# Altium schematic symbol library Orion-Bridge.SchLib: 52 symbols
Pins are listed as number, name and electrical type; pins without a type are passive.

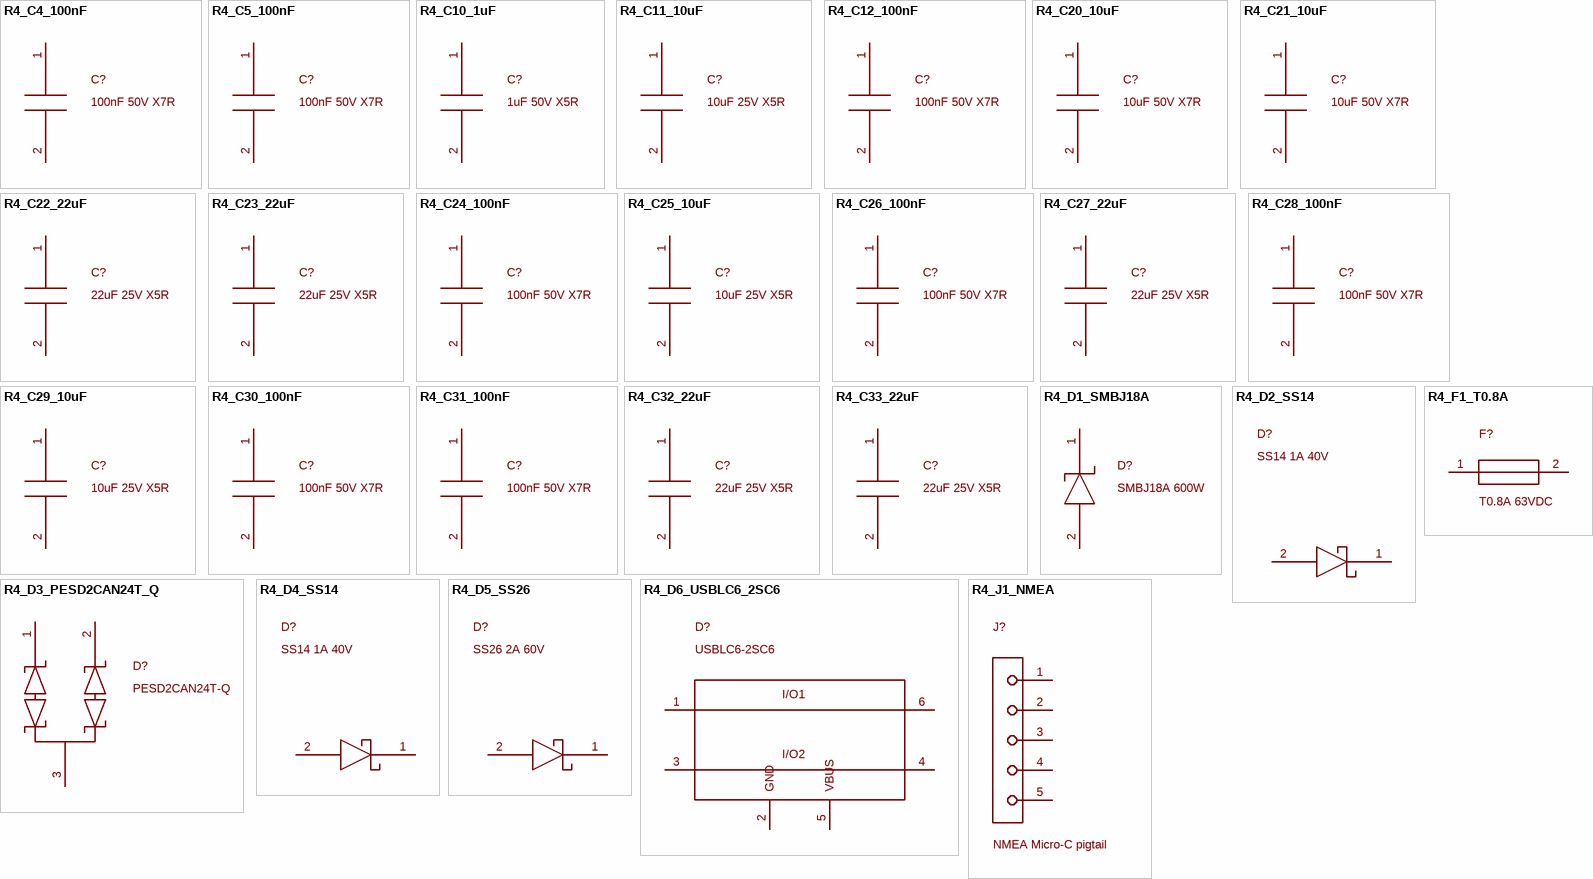
[diagram p0: symbols R4_C4_100nF to R4_J1_NMEA]

## R4_C4_100nF
designator C?, comment 100nF 50V X7R
100nF 16V X7R - generic specification; manufacturer/MPN not selected; Manufacturer: YAGEO; MPN: CC0603KRX7R9BB104; Manufacturer Part Number: CC0603KRX7R9BB104; Datasheet: https://www.lcsc.com/datasheet/lcsc_datasheet_2211101700_YAGEO-CC0603KRX7R9BB104_C14663.pdf; Supplier 1: LCSC; Supplier Part Number 1: C14663; Footprint Status: R4 reviewed package; see source and assembly audit
footprint C0603
pins: 1, 2

## R4_C5_100nF
designator C?, comment 100nF 50V X7R
100nF 16V X7R - generic specification; manufacturer/MPN not selected; Manufacturer: YAGEO; MPN: CC0603KRX7R9BB104; Manufacturer Part Number: CC0603KRX7R9BB104; Datasheet: https://www.lcsc.com/datasheet/lcsc_datasheet_2211101700_YAGEO-CC0603KRX7R9BB104_C14663.pdf; Supplier 1: LCSC; Supplier Part Number 1: C14663; Footprint Status: R4 reviewed package; see source and assembly audit
footprint C0603
pins: 1, 2

## R4_C10_1uF
designator C?, comment 1uF 50V X5R
Manufacturer: Samsung Electro-Mechanics; MPN: CL10A105KB8NNNC; Manufacturer Part Number: CL10A105KB8NNNC; Description: 1uF 50V X5R; Datasheet: https://www.lcsc.com/datasheet/lcsc_datasheet_2304140030_Samsung-Electro-Mechanics-CL10A105KB8NNNC_C15849.pdf; Supplier 1: LCSC; Supplier Part Number 1: C15849; Footprint Status: R4 reviewed package; see source and assembly audit
footprint C0603
pins: 1, 2

## R4_C11_10uF
designator C?, comment 10uF 25V X5R
Manufacturer: Samsung Electro-Mechanics; MPN: CL21A106KAYNNNE; Manufacturer Part Number: CL21A106KAYNNNE; Description: 10uF 25V X5R; Datasheet: https://www.lcsc.com/datasheet/lcsc_datasheet_2304140030_Samsung-Electro-Mechanics-CL21A106KAYNNNE_C15850.pdf; Supplier 1: LCSC; Supplier Part Number 1: C15850; Footprint Status: R4 reviewed package; see source and assembly audit
footprint C0805
pins: 1, 2

## R4_C12_100nF
designator C?, comment 100nF 50V X7R
Manufacturer: YAGEO; MPN: CC0603KRX7R9BB104; Manufacturer Part Number: CC0603KRX7R9BB104; Description: 100nF 50V X7R; Datasheet: https://www.lcsc.com/datasheet/lcsc_datasheet_2211101700_YAGEO-CC0603KRX7R9BB104_C14663.pdf; Supplier 1: LCSC; Supplier Part Number 1: C14663; Footprint Status: R4 reviewed package; see source and assembly audit
footprint C0603
pins: 1, 2

## R4_C20_10uF
designator C?, comment 10uF 50V X7R
Manufacturer: Samsung Electro-Mechanics; MPN: CL32B106KBJNNNE; Manufacturer Part Number: CL32B106KBJNNNE; Description: 10uF 50V X7R; Datasheet: https://datasheet.lcsc.com/lcsc/1912112237_Samsung-Electro-Mechanics-CL32B106KBJNNNE_C138687.pdf; Supplier 1: LCSC; Supplier Part Number 1: C138687; Footprint Status: R4 reviewed package; see source and assembly audit
footprint C1210
pins: 1, 2

## R4_C21_10uF
designator C?, comment 10uF 50V X7R
Manufacturer: Samsung Electro-Mechanics; MPN: CL32B106KBJNNNE; Manufacturer Part Number: CL32B106KBJNNNE; Description: 10uF 50V X7R; Datasheet: https://datasheet.lcsc.com/lcsc/1912112237_Samsung-Electro-Mechanics-CL32B106KBJNNNE_C138687.pdf; Supplier 1: LCSC; Supplier Part Number 1: C138687; Footprint Status: R4 reviewed package; see source and assembly audit
footprint C1210
pins: 1, 2

## R4_C22_22uF
designator C?, comment 22uF 25V X5R
Manufacturer: Samsung Electro-Mechanics; MPN: CL31A226KAHNNNE; Manufacturer Part Number: CL31A226KAHNNNE; Description: 22uF 25V X5R; Datasheet: https://www.lcsc.com/datasheet/lcsc_datasheet_2304140030_Samsung-Electro-Mechanics-CL31A226KAHNNNE_C12891.pdf; Supplier 1: LCSC; Supplier Part Number 1: C12891; Footprint Status: R4 reviewed package; see source and assembly audit
footprint C1206
pins: 1, 2

## R4_C23_22uF
designator C?, comment 22uF 25V X5R
Manufacturer: Samsung Electro-Mechanics; MPN: CL31A226KAHNNNE; Manufacturer Part Number: CL31A226KAHNNNE; Description: 22uF 25V X5R; Datasheet: https://www.lcsc.com/datasheet/lcsc_datasheet_2304140030_Samsung-Electro-Mechanics-CL31A226KAHNNNE_C12891.pdf; Supplier 1: LCSC; Supplier Part Number 1: C12891; Footprint Status: R4 reviewed package; see source and assembly audit
footprint C1206
pins: 1, 2

## R4_C24_100nF
designator C?, comment 100nF 50V X7R
Manufacturer: YAGEO; MPN: CC0603KRX7R9BB104; Manufacturer Part Number: CC0603KRX7R9BB104; Description: 100nF 50V X7R; Datasheet: https://www.lcsc.com/datasheet/lcsc_datasheet_2211101700_YAGEO-CC0603KRX7R9BB104_C14663.pdf; Supplier 1: LCSC; Supplier Part Number 1: C14663; Footprint Status: R4 reviewed package; see source and assembly audit
footprint C0603
pins: 1, 2

## R4_C25_10uF
designator C?, comment 10uF 25V X5R
Manufacturer: Samsung Electro-Mechanics; MPN: CL21A106KAYNNNE; Manufacturer Part Number: CL21A106KAYNNNE; Description: 10uF 25V X5R; Datasheet: https://www.lcsc.com/datasheet/lcsc_datasheet_2304140030_Samsung-Electro-Mechanics-CL21A106KAYNNNE_C15850.pdf; Supplier 1: LCSC; Supplier Part Number 1: C15850; Footprint Status: R4 reviewed package; see source and assembly audit
footprint C0805
pins: 1, 2

## R4_C26_100nF
designator C?, comment 100nF 50V X7R
Manufacturer: YAGEO; MPN: CC0603KRX7R9BB104; Manufacturer Part Number: CC0603KRX7R9BB104; Description: 100nF 50V X7R; Datasheet: https://www.lcsc.com/datasheet/lcsc_datasheet_2211101700_YAGEO-CC0603KRX7R9BB104_C14663.pdf; Supplier 1: LCSC; Supplier Part Number 1: C14663; Footprint Status: R4 reviewed package; see source and assembly audit
footprint C0603
pins: 1, 2

## R4_C27_22uF
designator C?, comment 22uF 25V X5R
Manufacturer: Samsung Electro-Mechanics; MPN: CL31A226KAHNNNE; Manufacturer Part Number: CL31A226KAHNNNE; Description: 22uF 25V X5R; Datasheet: https://www.lcsc.com/datasheet/lcsc_datasheet_2304140030_Samsung-Electro-Mechanics-CL31A226KAHNNNE_C12891.pdf; Supplier 1: LCSC; Supplier Part Number 1: C12891; Footprint Status: R4 reviewed package; see source and assembly audit
footprint C1206
pins: 1, 2

## R4_C28_100nF
designator C?, comment 100nF 50V X7R
Manufacturer: YAGEO; MPN: CC0603KRX7R9BB104; Manufacturer Part Number: CC0603KRX7R9BB104; Description: 100nF 50V X7R; Datasheet: https://www.lcsc.com/datasheet/lcsc_datasheet_2211101700_YAGEO-CC0603KRX7R9BB104_C14663.pdf; Supplier 1: LCSC; Supplier Part Number 1: C14663; Footprint Status: R4 reviewed package; see source and assembly audit
footprint C0603
pins: 1, 2

## R4_C29_10uF
designator C?, comment 10uF 25V X5R
Manufacturer: Samsung Electro-Mechanics; MPN: CL21A106KAYNNNE; Manufacturer Part Number: CL21A106KAYNNNE; Description: 10uF 25V X5R; Datasheet: https://www.lcsc.com/datasheet/lcsc_datasheet_2304140030_Samsung-Electro-Mechanics-CL21A106KAYNNNE_C15850.pdf; Supplier 1: LCSC; Supplier Part Number 1: C15850; Footprint Status: R4 reviewed package; see source and assembly audit
footprint C0805
pins: 1, 2

## R4_C30_100nF
designator C?, comment 100nF 50V X7R
Manufacturer: YAGEO; MPN: CC0603KRX7R9BB104; Manufacturer Part Number: CC0603KRX7R9BB104; Description: 100nF 50V X7R; Datasheet: https://www.lcsc.com/datasheet/lcsc_datasheet_2211101700_YAGEO-CC0603KRX7R9BB104_C14663.pdf; Supplier 1: LCSC; Supplier Part Number 1: C14663; Footprint Status: R4 reviewed package; see source and assembly audit
footprint C0603
pins: 1, 2

## R4_C31_100nF
designator C?, comment 100nF 50V X7R
Manufacturer: YAGEO; MPN: CC0603KRX7R9BB104; Manufacturer Part Number: CC0603KRX7R9BB104; Description: 100nF 50V X7R; Datasheet: https://www.lcsc.com/datasheet/lcsc_datasheet_2211101700_YAGEO-CC0603KRX7R9BB104_C14663.pdf; Supplier 1: LCSC; Supplier Part Number 1: C14663; Footprint Status: R4 reviewed package; see source and assembly audit
footprint C0603
pins: 1, 2

## R4_C32_22uF
designator C?, comment 22uF 25V X5R
Manufacturer: Samsung Electro-Mechanics; MPN: CL31A226KAHNNNE; Manufacturer Part Number: CL31A226KAHNNNE; Description: 22uF 25V X5R; Datasheet: https://www.lcsc.com/datasheet/lcsc_datasheet_2304140030_Samsung-Electro-Mechanics-CL31A226KAHNNNE_C12891.pdf; Supplier 1: LCSC; Supplier Part Number 1: C12891; Footprint Status: R4 reviewed package; see source and assembly audit
footprint C1206
pins: 1, 2

## R4_C33_22uF
designator C?, comment 22uF 25V X5R
Manufacturer: Samsung Electro-Mechanics; MPN: CL31A226KAHNNNE; Manufacturer Part Number: CL31A226KAHNNNE; Description: 22uF 25V X5R; Datasheet: https://www.lcsc.com/datasheet/lcsc_datasheet_2304140030_Samsung-Electro-Mechanics-CL31A226KAHNNNE_C12891.pdf; Supplier 1: LCSC; Supplier Part Number 1: C12891; Footprint Status: R4 reviewed package; see source and assembly audit
footprint C1206
pins: 1, 2

## R4_D1_SMBJ18A
designator D?, comment SMBJ18A 600W
Manufacturer: BORN; MPN: SMBJ18A; Manufacturer Part Number: SMBJ18A; Description: SMBJ18A 600W; Datasheet: https://www.lcsc.com/datasheet/lcsc_datasheet_2304140030_BORN-SMBJ18A_C152104.pdf; Supplier 1: LCSC; Supplier Part Number 1: C152104; Footprint Status: R4 reviewed package; see source and assembly audit
footprint SMB
pins: 1 K, 2 A

## R4_D2_SS14
designator D?, comment SS14 1A 40V
Manufacturer: MDD(Microdiode Semiconductor); MPN: SS14; Manufacturer Part Number: SS14; Description: SS14 1A 40V; Datasheet: https://www.lcsc.com/datasheet/lcsc_datasheet_2407101109_MDD-Microdiode-Semiconductor-SS14_C2480.pdf; Supplier 1: LCSC; Supplier Part Number 1: C2480; Footprint Status: R4 reviewed package; see source and assembly audit
footprint SMA
pins: 1 K, 2 A

## R4_D3_PESD2CAN24T_Q
designator D?, comment PESD2CAN24T-Q
Manufacturer: Nexperia; MPN: PESD2CAN24T-QR; Manufacturer Part Number: PESD2CAN24T-QR; Description: PESD2CAN24T-Q; Datasheet: https://assets.nexperia.com/documents/data-sheet/PESD2CAN24T-Q.pdf; Supplier 1: LCSC; Supplier Part Number 1: C28933048; Footprint Status: R4 reviewed package; see source and assembly audit
footprint SOT23_NEXPERIA_REFLOW
pins: 1 K1, 2 K2, 3 CC

## R4_D4_SS14
designator D?, comment SS14 1A 40V
Manufacturer: MDD(Microdiode Semiconductor); MPN: SS14; Manufacturer Part Number: SS14; Description: SS14 1A 40V; Datasheet: https://www.lcsc.com/datasheet/lcsc_datasheet_2407101109_MDD-Microdiode-Semiconductor-SS14_C2480.pdf; Supplier 1: LCSC; Supplier Part Number 1: C2480; Footprint Status: R4 reviewed package; see source and assembly audit
footprint SMA
pins: 1 K, 2 A

## R4_D5_SS26
designator D?, comment SS26 2A 60V
Manufacturer: MDD(Microdiode Semiconductor); MPN: SS26; Manufacturer Part Number: SS26; Description: SS26 2A 60V; Datasheet: https://www.lcsc.com/datasheet/lcsc_datasheet_2407101107_MDD-Microdiode-Semiconductor-SS26_C14238.pdf; Supplier 1: LCSC; Supplier Part Number 1: C14238; Footprint Status: R4 reviewed package; see source and assembly audit
footprint SMA
pins: 1 K, 2 A

## R4_D6_USBLC6_2SC6
designator D?, comment USBLC6-2SC6
Manufacturer: STMicroelectronics; MPN: USBLC6-2SC6; Manufacturer Part Number: USBLC6-2SC6; Description: USBLC6-2SC6; Datasheet: https://www.lcsc.com/datasheet/lcsc_datasheet_2410121836_STMicroelectronics-USBLC6-2SC6_C7519.pdf; Supplier 1: LCSC; Supplier Part Number 1: C7519; Footprint Status: R4 reviewed package; see source and assembly audit
footprint SOT23_6_ST_USBLC6
pins: 1 IO1, 2 GND, 3 IO2, 4 IO2, 5 VBUS, 6 IO1
text: I/O1; I/O2

## R4_F1_T0.8A
designator F?, comment T0.8A 63VDC
0.8 A slow-blow SMD ceramic fuse, 63 VDC, 50 A interrupt rating; Manufacturer: BOURNS; MPN: SF-1206S080-2; Manufacturer Part Number: SF-1206S080-2; Datasheet: https://wmsc.lcsc.com/wmsc/upload/file/pdf/v2/lcsc/2304140030_BOURNS-SF-1206S080-2_C3032873.pdf; Supplier 1: LCSC; Supplier Part Number 1: C3032873; Footprint Status: R4 reviewed package; see source and assembly audit
footprint BOURNS_SF1206S
pins: 1, 2

## R4_J1_NMEA
designator J?, comment NMEA Micro-C pigtail
Five direct wire-solder pads for a separately selected Micro-C cable; this is a PCB interface, not an invented connector MPN or face view; Footprint Status: R4 reviewed package; see source and assembly audit
footprint PIGTAIL_5_P3_D1P3
pins: 1 SHIELD, 2 NET-S, 3 NET-C, 4 CAN-H, 5 CAN-L

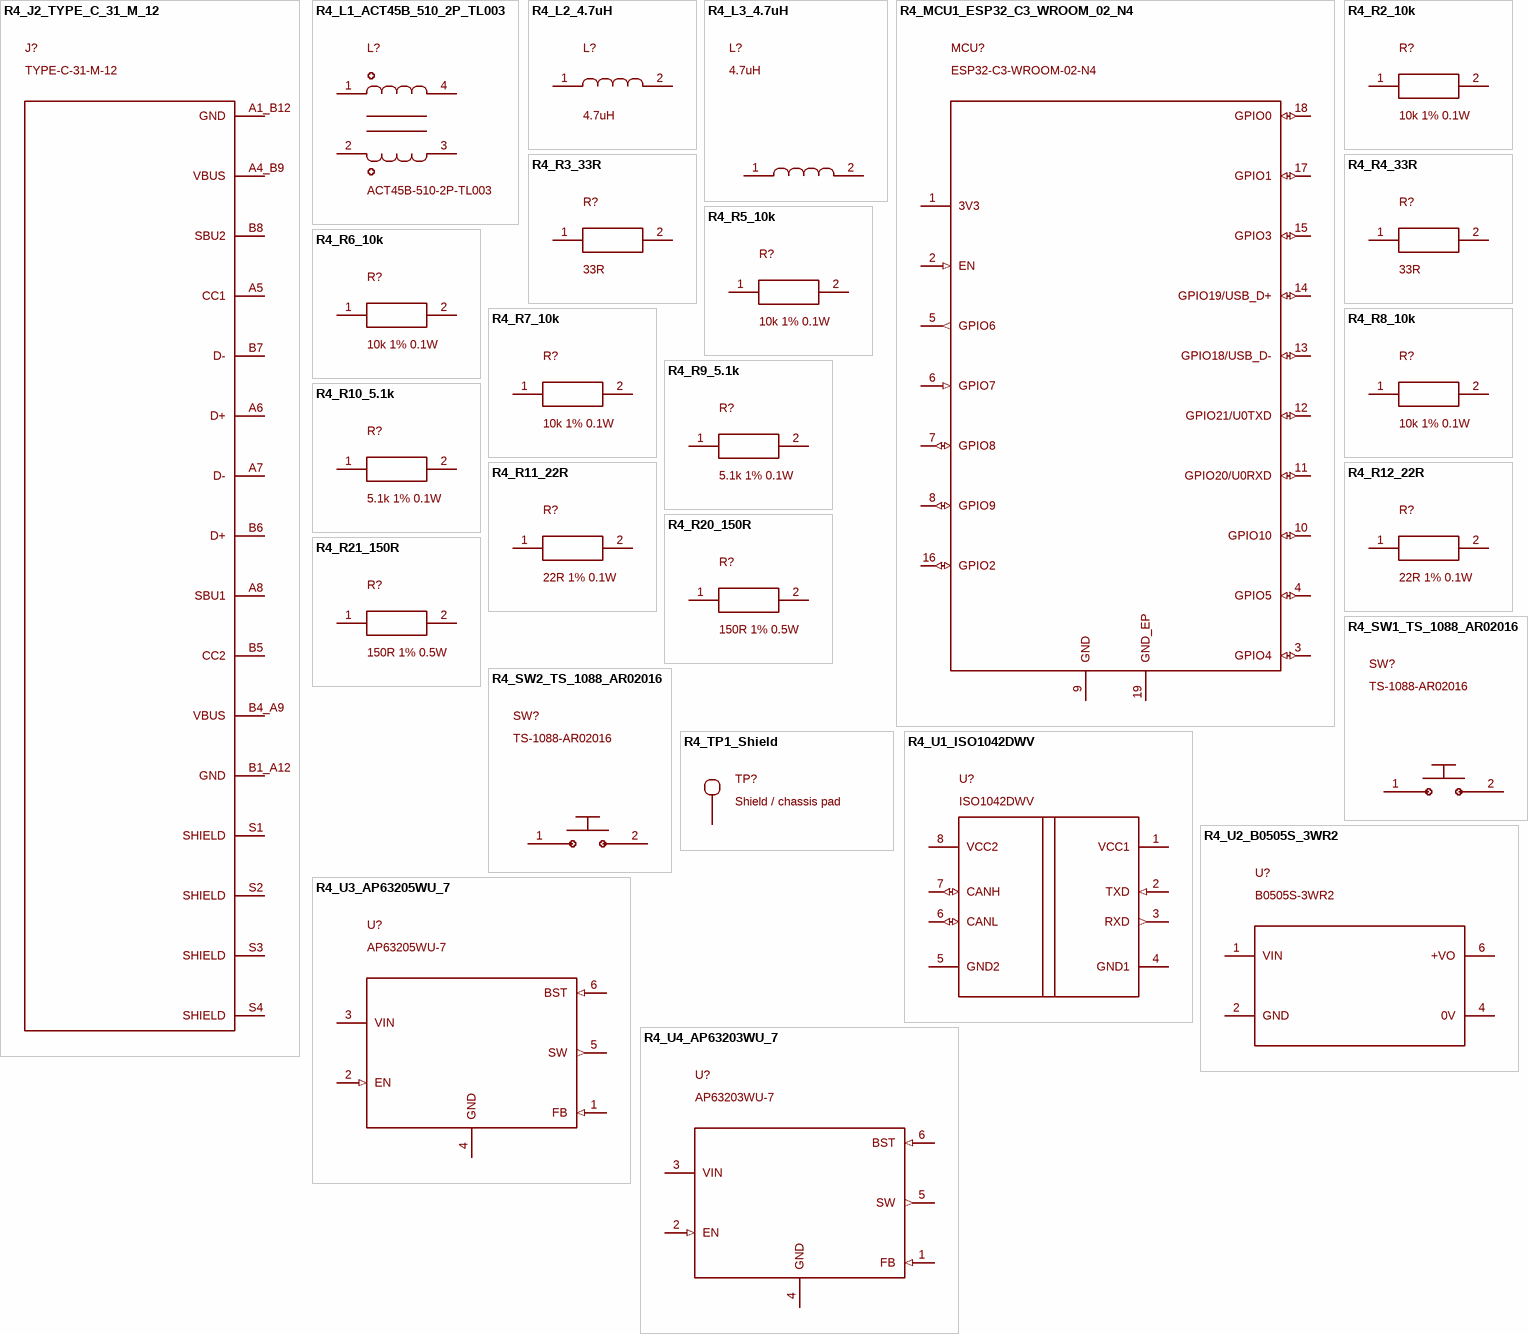
[diagram p1: symbols R4_J2_TYPE_C_31_M_12 to R4_U4_AP63203WU_7]

## R4_J2_TYPE_C_31_M_12
designator J?, comment TYPE-C-31-M-12
Manufacturer: Korean Hroparts Elec; MPN: TYPE-C-31-M-12; Manufacturer Part Number: TYPE-C-31-M-12; Description: TYPE-C-31-M-12; Datasheet: https://www.lcsc.com/datasheet/lcsc_datasheet_2205251630_Korean-Hroparts-Elec-TYPE-C-31-M-12_C165948.pdf; Supplier 1: LCSC; Supplier Part Number 1: C165948; Footprint Status: R4 reviewed package; see source and assembly audit
footprint USB_C_HRO_TYPE_C_31_M_12_2020
pins: A1_B12 GND, A4_B9 VBUS, A5 CC1, A6 D+, A7 D-, A8 SBU1, B1_A12 GND, B4_A9 VBUS, B5 CC2, B6 D+, B7 D-, B8 SBU2, S1 SHIELD, S2 SHIELD, S3 SHIELD, S4 SHIELD

## R4_L1_ACT45B_510_2P_TL003
designator L?, comment ACT45B-510-2P-TL003
Manufacturer: TDK; MPN: ACT45B-510-2P-TL003; Manufacturer Part Number: ACT45B-510-2P-TL003; Description: ACT45B-510-2P-TL003; Datasheet: https://www.lcsc.com/datasheet/lcsc_datasheet_1811151430_TDK-ACT45B-510-2P-TL003_C76584.pdf; Supplier 1: LCSC; Supplier Part Number 1: C76584; Footprint Status: R4 reviewed package; see source and assembly audit
footprint ACT45B
pins: 1 H_EXT, 2 L_EXT, 3 L_IC, 4 H_IC

## R4_L2_4.7uH
designator L?, comment 4.7uH
Manufacturer: Sunlord; MPN: SWPA4030S4R7MT; Manufacturer Part Number: SWPA4030S4R7MT; Description: 4.7uH; Datasheet: https://www.lcsc.com/datasheet/lcsc_datasheet_2310251551_Sunlord-SWPA4030S4R7MT_C57269.pdf; Supplier 1: LCSC; Supplier Part Number 1: C57269; Footprint Status: R4 reviewed package; see source and assembly audit
footprint SUNLORD_SWPA4030
pins: 1, 2

## R4_L3_4.7uH
designator L?, comment 4.7uH
Manufacturer: Sunlord; MPN: SWPA4030S4R7MT; Manufacturer Part Number: SWPA4030S4R7MT; Description: 4.7uH; Datasheet: https://www.lcsc.com/datasheet/lcsc_datasheet_2310251551_Sunlord-SWPA4030S4R7MT_C57269.pdf; Supplier 1: LCSC; Supplier Part Number 1: C57269; Footprint Status: R4 reviewed package; see source and assembly audit
footprint SUNLORD_SWPA4030
pins: 1, 2

## R4_MCU1_ESP32_C3_WROOM_02_N4
designator MCU?, comment ESP32-C3-WROOM-02-N4
Manufacturer: Espressif Systems; MPN: ESP32-C3-WROOM-02-N4; Manufacturer Part Number: ESP32-C3-WROOM-02-N4; Description: ESP32-C3-WROOM-02-N4; Datasheet: https://documentation.espressif.com/esp32-c3-wroom-02_datasheet_en.pdf; Supplier 1: LCSC; Supplier Part Number 1: C2934560; Footprint Status: R4 reviewed package; see source and assembly audit
footprint ESP32_C3_WROOM_02
pins: 1 3V3 (power), 2 EN (in), 3 GPIO4 (io), 4 GPIO5 (io), 5 GPIO6 (out), 6 GPIO7 (in), 7 GPIO8 (io), 8 GPIO9 (io), 9 GND (power), 10 GPIO10 (io), 11 GPIO20/U0RXD (io), 12 GPIO21/U0TXD (io), 13 GPIO18/USB_D- (io), 14 GPIO19/USB_D+ (io), 15 GPIO3 (io), 16 GPIO2 (io), 17 GPIO1 (io), 18 GPIO0 (io), 19 GND_EP (power)

## R4_R2_10k
designator R?, comment 10k 1% 0.1W
10k - generic specification; manufacturer/MPN not selected; Manufacturer: UNI-ROYAL(Uniroyal Elec); MPN: 0603WAF1002T5E; Manufacturer Part Number: 0603WAF1002T5E; Datasheet: https://www.lcsc.com/datasheet/lcsc_datasheet_2206010045_UNI-ROYAL-Uniroyal-Elec-0603WAF1002T5E_C25804.pdf; Supplier 1: LCSC; Supplier Part Number 1: C25804; Footprint Status: R4 reviewed package; see source and assembly audit
footprint R0603
pins: 1, 2

## R4_R3_33R
designator R?, comment 33R
33R - generic specification; manufacturer/MPN not selected; Manufacturer: UNI-ROYAL(Uniroyal Elec); MPN: 0603WAF330JT5E; Manufacturer Part Number: 0603WAF330JT5E; Datasheet: https://www.lcsc.com/datasheet/lcsc_datasheet_2206010116_UNI-ROYAL-Uniroyal-Elec-0603WAF330JT5E_C23140.pdf; Supplier 1: LCSC; Supplier Part Number 1: C23140; Footprint Status: R4 reviewed package; see source and assembly audit
footprint R0603
pins: 1, 2

## R4_R4_33R
designator R?, comment 33R
33R - generic specification; manufacturer/MPN not selected; Manufacturer: UNI-ROYAL(Uniroyal Elec); MPN: 0603WAF330JT5E; Manufacturer Part Number: 0603WAF330JT5E; Datasheet: https://www.lcsc.com/datasheet/lcsc_datasheet_2206010116_UNI-ROYAL-Uniroyal-Elec-0603WAF330JT5E_C23140.pdf; Supplier 1: LCSC; Supplier Part Number 1: C23140; Footprint Status: R4 reviewed package; see source and assembly audit
footprint R0603
pins: 1, 2

## R4_R5_10k
designator R?, comment 10k 1% 0.1W
Manufacturer: UNI-ROYAL(Uniroyal Elec); MPN: 0603WAF1002T5E; Manufacturer Part Number: 0603WAF1002T5E; Description: 10k 1% 0.1W; Datasheet: https://www.lcsc.com/datasheet/lcsc_datasheet_2206010045_UNI-ROYAL-Uniroyal-Elec-0603WAF1002T5E_C25804.pdf; Supplier 1: LCSC; Supplier Part Number 1: C25804; Footprint Status: R4 reviewed package; see source and assembly audit
footprint R0603
pins: 1, 2

## R4_R6_10k
designator R?, comment 10k 1% 0.1W
Manufacturer: UNI-ROYAL(Uniroyal Elec); MPN: 0603WAF1002T5E; Manufacturer Part Number: 0603WAF1002T5E; Description: 10k 1% 0.1W; Datasheet: https://www.lcsc.com/datasheet/lcsc_datasheet_2206010045_UNI-ROYAL-Uniroyal-Elec-0603WAF1002T5E_C25804.pdf; Supplier 1: LCSC; Supplier Part Number 1: C25804; Footprint Status: R4 reviewed package; see source and assembly audit
footprint R0603
pins: 1, 2

## R4_R7_10k
designator R?, comment 10k 1% 0.1W
Manufacturer: UNI-ROYAL(Uniroyal Elec); MPN: 0603WAF1002T5E; Manufacturer Part Number: 0603WAF1002T5E; Description: 10k 1% 0.1W; Datasheet: https://www.lcsc.com/datasheet/lcsc_datasheet_2206010045_UNI-ROYAL-Uniroyal-Elec-0603WAF1002T5E_C25804.pdf; Supplier 1: LCSC; Supplier Part Number 1: C25804; Footprint Status: R4 reviewed package; see source and assembly audit
footprint R0603
pins: 1, 2

## R4_R8_10k
designator R?, comment 10k 1% 0.1W
Manufacturer: UNI-ROYAL(Uniroyal Elec); MPN: 0603WAF1002T5E; Manufacturer Part Number: 0603WAF1002T5E; Description: 10k 1% 0.1W; Datasheet: https://www.lcsc.com/datasheet/lcsc_datasheet_2206010045_UNI-ROYAL-Uniroyal-Elec-0603WAF1002T5E_C25804.pdf; Supplier 1: LCSC; Supplier Part Number 1: C25804; Footprint Status: R4 reviewed package; see source and assembly audit
footprint R0603
pins: 1, 2

## R4_R9_5.1k
designator R?, comment 5.1k 1% 0.1W
Manufacturer: UNI-ROYAL(Uniroyal Elec); MPN: 0603WAF5101T5E; Manufacturer Part Number: 0603WAF5101T5E; Description: 5.1k 1% 0.1W; Datasheet: https://www.lcsc.com/datasheet/lcsc_datasheet_2206010116_UNI-ROYAL-Uniroyal-Elec-0603WAF5101T5E_C23186.pdf; Supplier 1: LCSC; Supplier Part Number 1: C23186; Footprint Status: R4 reviewed package; see source and assembly audit
footprint R0603
pins: 1, 2

## R4_R10_5.1k
designator R?, comment 5.1k 1% 0.1W
Manufacturer: UNI-ROYAL(Uniroyal Elec); MPN: 0603WAF5101T5E; Manufacturer Part Number: 0603WAF5101T5E; Description: 5.1k 1% 0.1W; Datasheet: https://www.lcsc.com/datasheet/lcsc_datasheet_2206010116_UNI-ROYAL-Uniroyal-Elec-0603WAF5101T5E_C23186.pdf; Supplier 1: LCSC; Supplier Part Number 1: C23186; Footprint Status: R4 reviewed package; see source and assembly audit
footprint R0603
pins: 1, 2

## R4_R11_22R
designator R?, comment 22R 1% 0.1W
Manufacturer: UNI-ROYAL(Uniroyal Elec); MPN: 0603WAF220JT5E; Manufacturer Part Number: 0603WAF220JT5E; Description: 22R 1% 0.1W; Datasheet: https://www.lcsc.com/datasheet/lcsc_datasheet_2206010100_UNI-ROYAL-Uniroyal-Elec-0603WAF220JT5E_C23345.pdf; Supplier 1: LCSC; Supplier Part Number 1: C23345; Footprint Status: R4 reviewed package; see source and assembly audit
footprint R0603
pins: 1, 2

## R4_R12_22R
designator R?, comment 22R 1% 0.1W
Manufacturer: UNI-ROYAL(Uniroyal Elec); MPN: 0603WAF220JT5E; Manufacturer Part Number: 0603WAF220JT5E; Description: 22R 1% 0.1W; Datasheet: https://www.lcsc.com/datasheet/lcsc_datasheet_2206010100_UNI-ROYAL-Uniroyal-Elec-0603WAF220JT5E_C23345.pdf; Supplier 1: LCSC; Supplier Part Number 1: C23345; Footprint Status: R4 reviewed package; see source and assembly audit
footprint R0603
pins: 1, 2

## R4_R20_150R
designator R?, comment 150R 1% 0.5W
Manufacturer: SEI(Stackpole Elec); MPN: RNCP1206FTD150R; Manufacturer Part Number: RNCP1206FTD150R; Description: 150R 1% 0.5W; Datasheet: https://wmsc.lcsc.com/wmsc/upload/file/pdf/v2/lcsc/2404111532_SEI-Stackpole-Elec-RNCP1206FTD150R_C4258541.pdf; Supplier 1: LCSC; Supplier Part Number 1: C4258541; Footprint Status: R4 reviewed package; see source and assembly audit
footprint R1206
pins: 1, 2

## R4_R21_150R
designator R?, comment 150R 1% 0.5W
Manufacturer: SEI(Stackpole Elec); MPN: RNCP1206FTD150R; Manufacturer Part Number: RNCP1206FTD150R; Description: 150R 1% 0.5W; Datasheet: https://wmsc.lcsc.com/wmsc/upload/file/pdf/v2/lcsc/2404111532_SEI-Stackpole-Elec-RNCP1206FTD150R_C4258541.pdf; Supplier 1: LCSC; Supplier Part Number 1: C4258541; Footprint Status: R4 reviewed package; see source and assembly audit
footprint R1206
pins: 1, 2

## R4_SW1_TS_1088_AR02016
designator SW?, comment TS-1088-AR02016
Manufacturer: XUNPU; MPN: TS-1088-AR02016; Manufacturer Part Number: TS-1088-AR02016; Description: TS-1088-AR02016; Datasheet: https://www.lcsc.com/datasheet/lcsc_datasheet_2304140030_XUNPU-TS-1088-AR02016_C720477.pdf; Supplier 1: LCSC; Supplier Part Number 1: C720477; Footprint Status: R4 reviewed package; see source and assembly audit
footprint SW_XUNPU_TS1088_AR
pins: 1 A, 2 B

## R4_SW2_TS_1088_AR02016
designator SW?, comment TS-1088-AR02016
Manufacturer: XUNPU; MPN: TS-1088-AR02016; Manufacturer Part Number: TS-1088-AR02016; Description: TS-1088-AR02016; Datasheet: https://www.lcsc.com/datasheet/lcsc_datasheet_2304140030_XUNPU-TS-1088-AR02016_C720477.pdf; Supplier 1: LCSC; Supplier Part Number 1: C720477; Footprint Status: R4 reviewed package; see source and assembly audit
footprint SW_XUNPU_TS1088_AR
pins: 1 A, 2 B

## R4_TP1_Shield
designator TP?, comment Shield / chassis pad
Shield / chassis pad - generic specification; manufacturer/MPN not selected; Footprint Status: R4 reviewed package; see source and assembly audit
footprint TESTPOINT_2MM
pins: 1 SHIELD

## R4_U1_ISO1042DWV
designator U?, comment ISO1042DWV
Manufacturer: Texas Instruments; MPN: ISO1042DWVR; Manufacturer Part Number: ISO1042DWVR; Description: ISO1042DWV; Datasheet: https://datasheet.lcsc.com/lcsc/2302212001_Texas-Instruments-ISO1042DWVR_C2671714.pdf; Supplier 1: LCSC; Supplier Part Number 1: C2671714; Footprint Status: R4 reviewed package; see source and assembly audit
footprint SOIC8_DWV
pins: 1 VCC1 (power), 2 TXD (in), 3 RXD (out), 4 GND1 (power), 5 GND2 (power), 6 CANL (io), 7 CANH (io), 8 VCC2 (power)

## R4_U2_B0505S_3WR2
designator U?, comment B0505S-3WR2
Manufacturer: EVISUN; MPN: B0505S-3WR2; Manufacturer Part Number: B0505S-3WR2; Description: B0505S-3WR2; Datasheet: https://wmsc.lcsc.com/wmsc/upload/file/pdf/v2/lcsc/2308311627_EVISUN-B0505S-3WR2_C7500927.pdf; Supplier 1: LCSC; Supplier Part Number 1: C7500927; Footprint Status: R4 reviewed package; see source and assembly audit
footprint EVISUN_B0505S_3WR2
pins: 1 VIN (power), 2 GND (power), 4 0V (power), 6 +VO (power)

## R4_U3_AP63205WU_7
designator U?, comment AP63205WU-7
Manufacturer: Diodes Incorporated; MPN: AP63205WU-7; Manufacturer Part Number: AP63205WU-7; Description: AP63205WU-7; Datasheet: https://www.lcsc.com/datasheet/lcsc_datasheet_2210280930_Diodes-Incorporated-AP63205WU-7_C2071056.pdf; Supplier 1: LCSC; Supplier Part Number 1: C2071056; Footprint Status: R4 reviewed package; see source and assembly audit
footprint TSOT26_DIODES
pins: 1 FB (in), 2 EN (in), 3 VIN (power), 4 GND (power), 5 SW (out), 6 BST (in)

## R4_U4_AP63203WU_7
designator U?, comment AP63203WU-7
Manufacturer: Diodes Incorporated; MPN: AP63203WU-7; Manufacturer Part Number: AP63203WU-7; Description: AP63203WU-7; Datasheet: https://www.lcsc.com/datasheet/lcsc_datasheet_2201131130_Diodes-Incorporated-AP63203WU-7_C780769.pdf; Supplier 1: LCSC; Supplier Part Number 1: C780769; Footprint Status: R4 reviewed package; see source and assembly audit
footprint TSOT26_DIODES
pins: 1 FB (in), 2 EN (in), 3 VIN (power), 4 GND (power), 5 SW (out), 6 BST (in)